# Altium footprint library Thunderscope_Rev5.3.PcbLib: 68 footprints (part 2 of 5)
Each footprint in its own frame and in the unit in brackets; x right, y up, seen from the top. Pads: shape width x height; smd on the part's side, far side on the other; paste and mask are expansions set on the pad; w line width, h text height; cw(c..) or ccw(c..) is an arc to the next point about the centre after c.
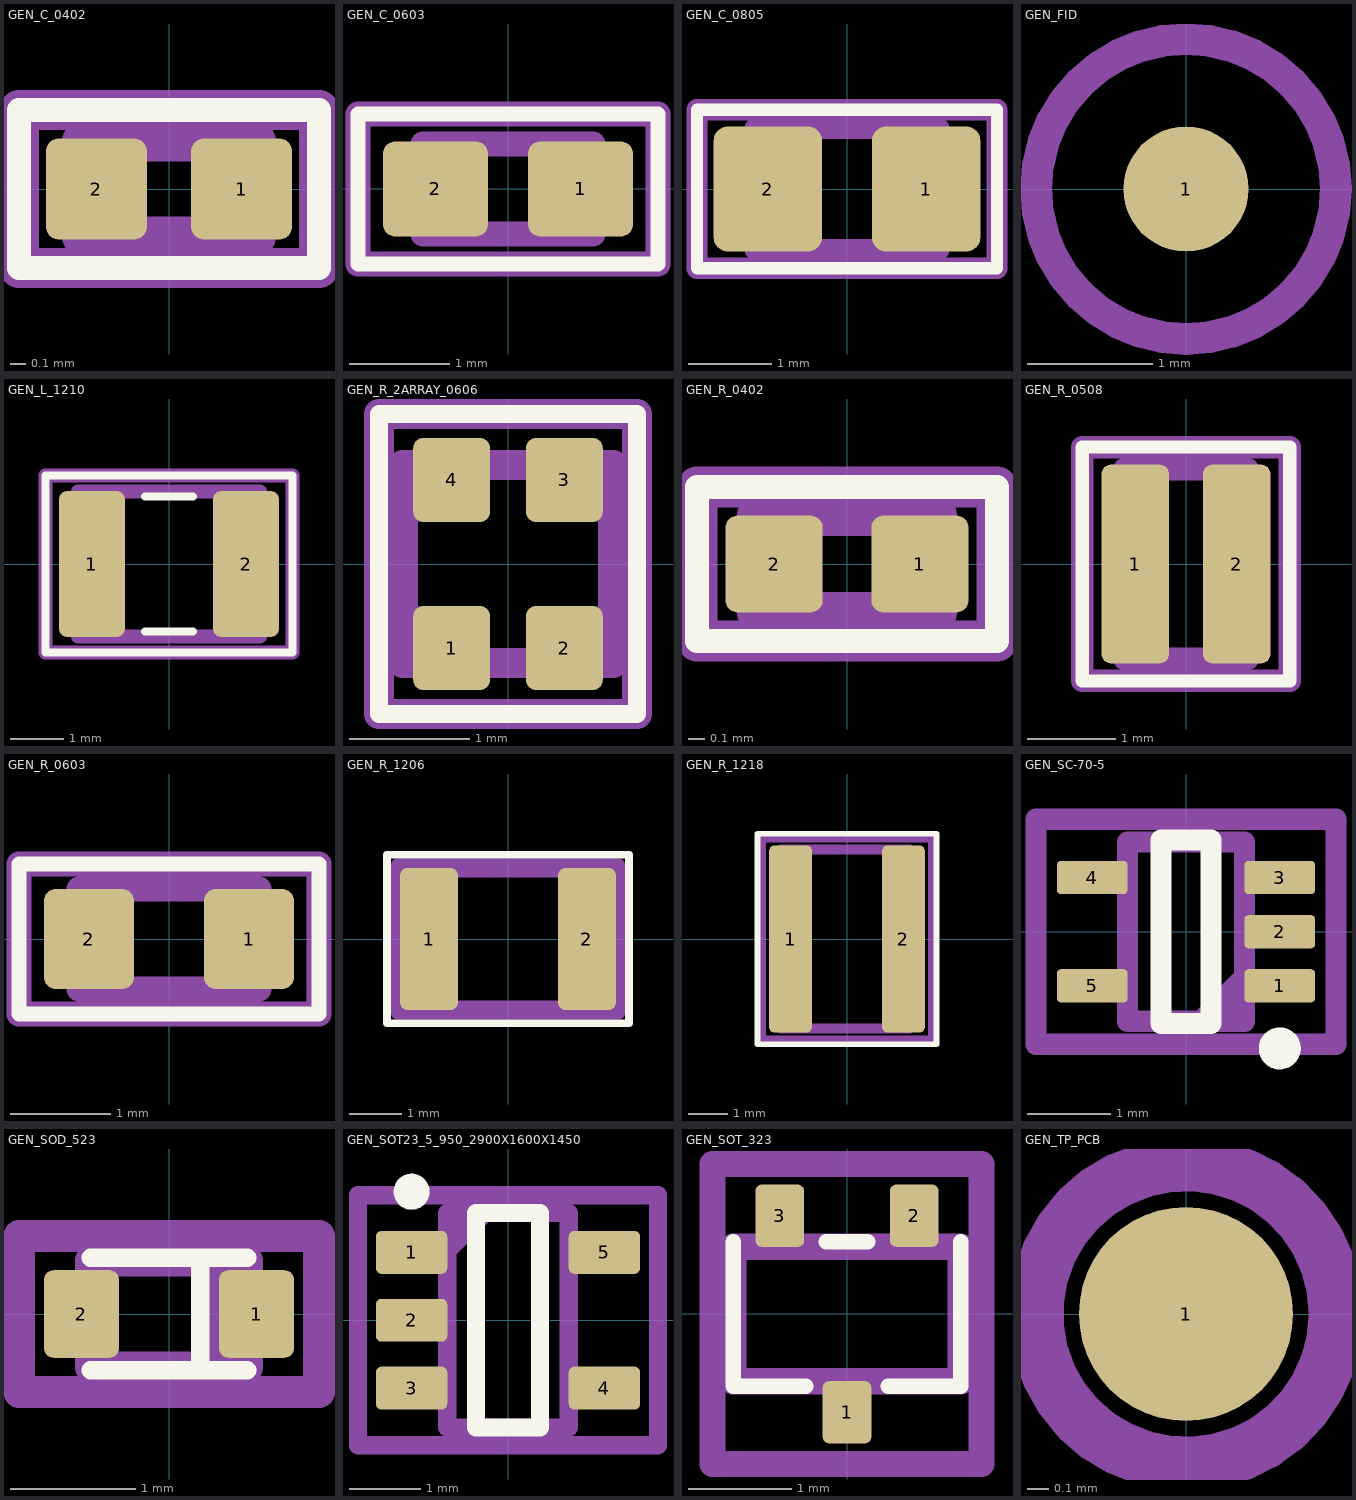
[diagram p1: the footprints below, top view; thin cyan lines are the x and y axes]

## GEN_C_0402 [mm]
pads (2):
  rrect25% 0.64x0.64 smd mask+0: 1(0.46,0) 2(-0.46,0)
Top Overlay:
  lines w0.15: -0.95,-0.5 0.95,-0.5 0.95,0.5 -0.95,0.5 -0.95,-0.5
Mechanical 4:
  lines w0.254: -0.95,-0.5 0.95,-0.5 0.95,0.5 -0.95,0.5 -0.95,-0.5
Mechanical 7:
  lines w0.254: -0.55,-0.3 -0.55,0.3 0.55,0.3 0.55,-0.3 -0.55,-0.3
  text "'.Designator'" at 0.082,0.057 h0.2
3D body "CAPC1005X06N.step": height 0.6, standoff 0, extent -0.55,-0.3 0.55,0.3

## GEN_C_0603 [mm]
pads (2):
  rrect25% 1.05x0.95 smd mask+0: 1(0.725,0) 2(-0.725,0)
Top Overlay:
  lines w0.15: -1.5,-0.75 -1.5,0.75 1.5,0.75 1.5,-0.75 -1.5,-0.75
Mechanical 4:
  lines w0.254: -1.5,-0.75 -1.5,0.75 1.5,0.75 1.5,-0.75 -1.5,-0.75
Mechanical 7:
  lines w0.254: -0.85,-0.45 -0.85,0.45 0.85,0.45 0.85,-0.45 -0.85,-0.45
  text "'.Designator'" at 0.228,0.1 h0.3
3D body "GEN_C_0603.step": height 0.9, standoff 0, extent -0.85,-0.45 0.85,0.45

## GEN_C_0805 [mm]
pads (2):
  rrect25% 1.3x1.5 smd mask+0: 1(0.95,0) 2(-0.95,0)
Top Overlay:
  lines w0.15: -1.8,-0.95 1.8,-0.95 1.8,0.95 -1.8,0.95 -1.8,-0.95
Mechanical 4:
  lines w0.254: -1.8,-0.95 1.8,-0.95 1.8,0.95 -1.8,0.95 -1.8,-0.95
Mechanical 7:
  lines w0.254: -1.1,-0.725 -1.1,0.725 1.1,0.725 1.1,-0.725 -1.1,-0.725
  text "'.Designator'" at 0.226,0.115 h0.4
3D body "GEN_C_0805.step": height 1.45, standoff 0, extent -1.1,-0.725 1.1,0.725

## GEN_FID [mm]
pads (1):
  round 1 smd paste-1 mask-1: 1(0,0)
Top Solder:
  circle w1: c0,0 r0.5
Mechanical 4:
  circle w0.254: c0,0 r1.2

## GEN_L_1210 [mm]
pads (2):
  rrect25% 1.23x2.72 smd mask+0: 1(-1.435,0) 2(1.435,0)
Top Overlay:
  lines w0.15: -0.45,-1.26 0.45,-1.26 ; -0.45,1.26 0.45,1.26 ; -2.3,-1.65 -2.3,1.65 2.3,1.65 2.3,-1.65 -2.3,-1.65
Mechanical 5:
  lines w0.254: -2.3,-1.65 -2.3,1.65 2.3,1.65 2.3,-1.65 -2.3,-1.65
Mechanical 6:
  lines w0.254: -1.7,-1.35 -1.7,1.35 1.7,1.35 1.7,-1.35 -1.7,-1.35
  text "'.Designator'" at -0.12,-0.14 h0.5
3D body "GEN_L_1210.step": height 1.2, standoff 0, extent -1.7,-1.35 1.7,1.35

## GEN_R_2ARRAY_0606 [mm]
pads (4):
  rrect25% 0.64x0.7 smd mask+0: 1(-0.47,-0.7) 2(0.47,-0.7) 3(0.47,0.7) 4(-0.47,0.7)
Top Overlay:
  lines w0.15: -1.075,-1.25 1.075,-1.25 1.075,1.25 -1.075,1.25 -1.075,-1.25
Mechanical 5:
  lines w0.254: -1.075,-1.25 1.075,-1.25 1.075,1.25 -1.075,1.25 -1.075,-1.25
Mechanical 6:
  lines w0.254: -0.875,-0.825 -0.875,0.825 0.875,0.825 0.875,-0.825 -0.875,-0.825
  text "'.Designator'" at 0.12,0.086 h0.3
3D body "SMT_1002P1AT_VIS.step": height 0.56, standoff 0, extent -0.826,-0.881 0.826,0.881

## GEN_R_0402 [mm]
pads (2):
  rrect25% 0.6x0.6 smd mask+0: 1(0.45,0) 2(-0.45,0)
Top Overlay:
  lines w0.15: -0.925,-0.475 -0.925,0.475 0.925,0.475 0.925,-0.475 -0.925,-0.475
Mechanical 4:
  lines w0.254: -0.925,-0.475 -0.925,0.475 0.925,0.475 0.925,-0.475 -0.925,-0.475
Mechanical 7:
  lines w0.254: -0.55,-0.3 -0.55,0.3 0.55,0.3 0.55,-0.3 -0.55,-0.3
  text "'.Designator'" at -0.083,-0.057 h0.2
3D body "GEN_R_0402.step": height 0.4, standoff 0, extent -0.55,-0.3 0.55,0.3

## GEN_R_0508 [mm]
pads (2):
  rrect25% 0.762x2.25 smd mask+0: 1(-0.575,0) 2(0.575,0)
Top Overlay:
  lines w0.15: -1.175,-1.325 1.175,-1.325 1.175,1.325 -1.175,1.325 -1.175,-1.325
Mechanical 5:
  lines w0.254: -1.175,-1.325 1.175,-1.325 1.175,1.325 -1.175,1.325 -1.175,-1.325
Mechanical 6:
  lines w0.254: -0.7,-1.075 0.7,-1.075 0.7,1.075 -0.7,1.075 -0.7,-1.075
  text "'.Designator'" at -0.1,0.319 h0.3

## GEN_R_0603 [mm]
pads (2):
  rrect25% 0.9x1 smd mask+0: 1(0.8,0) 2(-0.8,0)
Top Overlay:
  lines w0.15: -1.5,-0.75 -1.5,0.75 1.5,0.75 1.5,-0.75 -1.5,-0.75
Mechanical 4:
  lines w0.254: -1.5,-0.75 -1.5,0.75 1.5,0.75 1.5,-0.75 -1.5,-0.75
Mechanical 7:
  lines w0.254: -0.9,-0.5 -0.9,0.5 0.9,0.5 0.9,-0.5 -0.9,-0.5
  text "'.Designator'" at -0.214,-0.066 h0.2
3D body "GEN_R_0603.step": height 0.6, standoff 0, extent -0.9,-0.5 0.9,0.5

## GEN_R_1206 [mm]
pads (2):
  rrect25% 1.1x2.7 smd mask+0.102: 1(-1.5,0) 2(1.5,0)
Top Overlay:
  lines w0.15: -2.3,-1.6 -2.3,1.6 2.3,1.6 2.3,-1.6 -2.3,-1.6
Mechanical 4:
  lines w0.254: -2.1,-1.4 -2.1,1.4 2.1,1.4 2.1,-1.4 -2.1,-1.4
Mechanical 7:
  lines w0.254: -1.7,-1.3 -1.7,1.3 1.7,1.3 1.7,-1.3 -1.7,-1.3
  text "'.Designator'" at -0.214,-0.066 h0.2
3D body "CRCW12100000Z0EAHP.stp": height 0.7, standoff 0, extent -1.6,-1.25 1.6,1.25

## GEN_R_1218 [mm]
pads (2):
  rrect25% 1.1x4.8 smd: 1(-1.45,0) 2(1.45,0)
Top Overlay:
  lines w0.15: -2.3,-2.7 2.3,-2.7 2.3,2.7 -2.3,2.7 -2.3,-2.7
Mechanical 5:
  lines w0.254: -2.2,-2.6 2.2,-2.6 2.2,2.6 -2.2,2.6 -2.2,-2.6
Mechanical 6:
  lines w0.254: -1.7,-2.299 1.6,-2.299 1.6,2.3 -1.7,2.3 -1.7,-2.299
  text "'.Designator'" at -0.1,0.319 h0.3
3D body "CRCW12181R00FKEKHP.stp": height 0.7, standoff 0, extent -1.55,-2.3 1.55,2.3

## GEN_SC-70-5 [mm]
pads (5):
  rrect25% 0.85x0.4 smd mask+0: 1(1.125,-0.65) 2(1.125,0) 3(1.125,0.65) 4(-1.125,0.65) 5(-1.125,-0.65)
Top Overlay:
  circle w0.254: c1.125,-1.4 r0.125
  lines w0.254: -0.3,-1.1 0.3,-1.1 0.3,1.1 -0.3,1.1 -0.3,-1.1
Mechanical 4:
  lines w0.254: -1.8,-1.35 1.8,-1.35 1.8,1.35 -1.8,1.35 -1.8,-1.35
Mechanical 7:
  region: 0,-1.075 0.7,-1.075 0.7,-0.375
  lines w0.254: -0.7,-1.075 -0.7,1.075 0.7,1.075 0.7,-1.075 -0.7,-1.075
  text "'.Designator'" at 0.113,-0.233 h0.4
3D body "GEN_SC-70-5.step": height 1.1, standoff 0, extent -1.2,-1.075 1.2,1.075

## GEN_SOD_523 [mm]
pads (2):
  rrect25% 0.6x0.7 smd mask+0: 1(0.7,0) 2(-0.7,0)
Top Overlay:
  lines w0.15: -0.625,-0.45 0.625,-0.45 ; -0.625,0.45 0.625,0.45 ; 0.25,-0.45 0.25,0.45
Mechanical 4:
  lines w0.254: -1.2,-0.625 1.2,-0.625 1.2,0.625 -1.2,0.625 -1.2,-0.625
Mechanical 7:
  lines w0.254: 0.325,-0.425 0.325,0.425 ; -0.625,-0.425 0.625,-0.425 0.625,0.425 -0.625,0.425 -0.625,-0.425
  text "'.Designator'" at -0.163,-0.05 h0.15
3D body "D_SOD-523.step": height 0.63, standoff 0, extent -0.8,-0.4 0.8,0.4

## GEN_SOT23_5_950_2900X1600X1450 [mm]
pads (5):
  rrect25% 1x0.6 smd mask+0: 1(-1.35,0.95) 2(-1.35,0) 3(-1.35,-0.95) 4(1.35,-0.95) 5(1.35,0.95)
Top Overlay:
  circle w0.254: c-1.35,1.8 r0.125
  lines w0.254: -0.45,-1.5 -0.45,1.5 0.45,1.5 0.45,-1.5 -0.45,-1.5
Mechanical 5:
  lines w0.254: -2.1,-1.75 -2.1,1.75 2.1,1.75 2.1,-1.75 -2.1,-1.75
Mechanical 6:
  region: -0.85,0.8 -0.85,1.5 -0.15,1.5
  lines w0.254: -0.85,-1.5 0.85,-1.5 0.85,1.5 -0.85,1.5 -0.85,-1.5
  text "'.Designator'" at 0.113,-0.11 h0.4
3D body "GEN_SOT23_5_950_2900X1600X1450.step": height 1.45, standoff 0, extent -1.5,-1.5 1.5,1.5

## GEN_SOT_323 [mm]
pads (3):
  rrect25% 0.47x0.6 smd mask+0: 1(0,-0.95) 2(0.65,0.95) 3(-0.65,0.95)
Top Overlay:
  lines w0.15: -1.1,0.7 -1.1,-0.7 -0.4,-0.7 ; -0.2,0.7 0.2,0.7 ; 0.4,-0.7 1.1,-0.7 1.1,0.7
Mechanical 4:
  lines w0.254: -1.3,-1.45 -1.3,1.45 1.3,1.45 1.3,-1.45 -1.3,-1.45
Mechanical 7:
  lines w0.254: -1.1,-0.65 -1.1,0.65 1.1,0.65 1.1,-0.65 -1.1,-0.65
  text "'.Designator'" at 0.33,0.101 h0.3
3D body "DMN62D0UW-7.step": height 1.1, standoff 0, extent -1.075,-1.05 1.075,1.05

## GEN_TP_PCB [mm]
pads (1):
  round 1 smd paste-1 mask+0: 1(0,0)
Mechanical 4:
  circle w0.254: c0,0 r0.7